# Altium footprint library Copy of PcbLib1.PcbLib: 7 footprints
Each footprint in its own frame and in the unit in brackets; x right, y up, seen from the top. Pads: shape width x height; smd on the part's side, far side on the other; paste and mask are expansions set on the pad; w line width, h text height; cw(c..) or ccw(c..) is an arc to the next point about the centre after c.
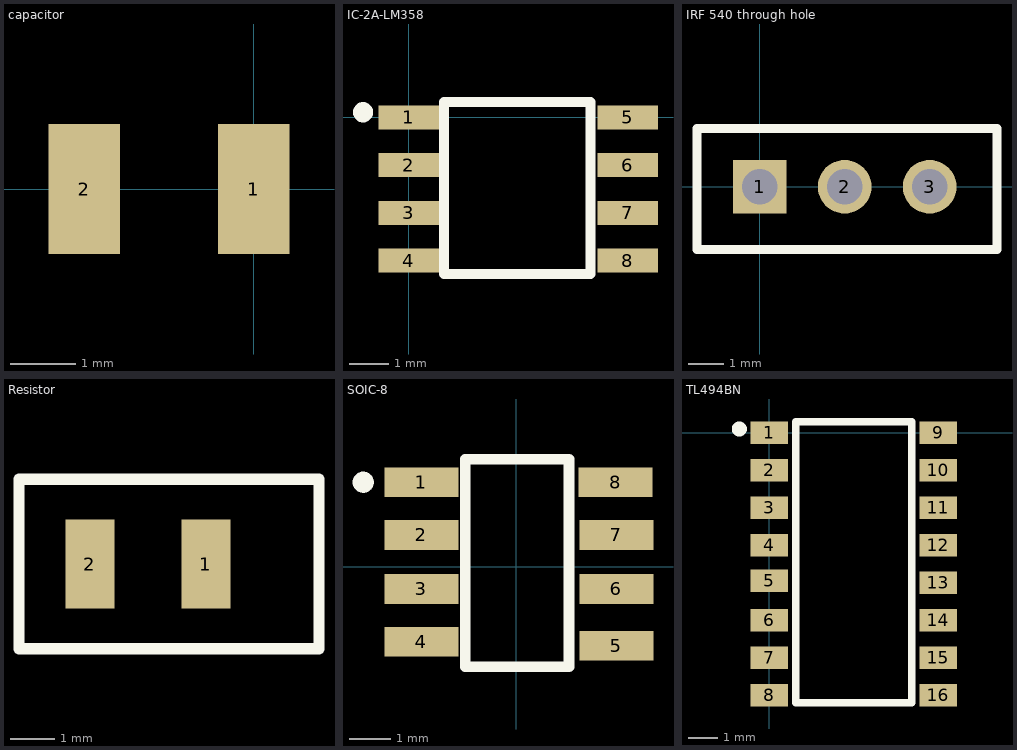
[diagram p0: the footprints below, top view; thin cyan lines are the x and y axes]

## capacitor [mm]
pads (2):
  rect 1.1x2 smd paste-2539.97 mask-2539.97: 1(0,0) 2(-2.6,0)
Top Paste:
  region: -0.55,-1 -0.55,1 0.55,1 0.55,-1
  region: -3.15,-1 -3.15,1 -2.05,1 -2.05,-1
Top Solder:
  region: -0.75,-1.25 -0.75,1.25 0.75,1.25 0.75,-1.25
  region: -3.35,-1.25 -3.35,1.25 -1.85,1.25 -1.85,-1.25

## IC-2A-LM358 [mm]
pads (8):
  rect 1.52x0.6 smd paste-2539.97 mask-2539.97: 1(0,0) 2(0,-1.2) 3(0,-2.4) 4(0,-3.6) 5(5.5,0) 6(5.5,-1.2) 7(5.5,-2.4) 8(5.5,-3.6)
Top Overlay:
  circle w0.254: c-1.143,0.127 r0.127
  lines w0.254: 0.889,-3.937 0.889,0.381 4.572,0.381 4.572,-3.937 0.889,-3.937
Top Paste:
  region: 4.738,-3.9 4.738,-3.3 6.262,-3.3 6.262,-3.9
  region: 4.738,-2.7 4.738,-2.1 6.262,-2.1 6.262,-2.7
  region: 4.738,-1.5 4.738,-0.9 6.262,-0.9 6.262,-1.5
  region: 4.738,-0.3 4.738,0.3 6.262,0.3 6.262,-0.3
  region: -0.762,-3.9 -0.762,-3.3 0.762,-3.3 0.762,-3.9
  region: -0.762,-2.7 -0.762,-2.1 0.762,-2.1 0.762,-2.7
  region: -0.762,-1.5 -0.762,-0.9 0.762,-0.9 0.762,-1.5
  region: -0.762,-0.3 -0.762,0.3 0.762,0.3 0.762,-0.3
Top Solder:
  region: 4.738,-3.9 4.738,-3.3 6.262,-3.3 6.262,-3.9
  region: 4.738,-2.7 4.738,-2.1 6.262,-2.1 6.262,-2.7
  region: 4.738,-1.5 4.738,-0.9 6.262,-0.9 6.262,-1.5
  region: 4.738,-0.3 4.738,0.3 6.262,0.3 6.262,-0.3
  region: -0.762,-3.9 -0.762,-3.3 0.762,-3.3 0.762,-3.9
  region: -0.762,-2.7 -0.762,-2.1 0.762,-2.1 0.762,-2.7
  region: -0.762,-1.5 -0.762,-0.9 0.762,-0.9 0.762,-1.5
  region: -0.762,-0.3 -0.762,0.3 0.762,0.3 0.762,-0.3

## IRF 540 through hole [mil]
pads (3):
  rect 60x60 hole 39.37: 1(0,0)
  round 60 hole 39.37: 2(94.88,0) 3(189.76,0)
Top Overlay:
  lines w10: 90,65 245,65 265,65 265,-70 -70,-70 -70,65 95,65

## PCBComponent_1 - duplicate [mil]

## Resistor [mm]
pads (2):
  rect 1.1x2 smd paste-2539.97 mask-2539.97: 1(116.332,-215.9) 2(113.732,-215.9)
Top Overlay:
  lines w0.254: 112.141,-217.805 112.141,-213.995 112.395,-213.995 118.872,-213.995 118.872,-217.805 112.141,-217.805
Top Paste:
  region: 115.782,-216.9 115.782,-214.9 116.882,-214.9 116.882,-216.9
  region: 113.182,-216.9 113.182,-214.9 114.282,-214.9 114.282,-216.9
Top Solder:
  region: 115.582,-217.15 115.582,-214.65 117.082,-214.65 117.082,-217.15
  region: 112.982,-217.15 112.982,-214.65 114.482,-214.65 114.482,-217.15

## SOIC-8 [mm]
pads (8):
  rect 1.78x0.72 smd paste-2539.97 mask-2539.97: 1(-2.286,2.032) 2(-2.286,0.762) 3(-2.286,-0.538) 4(-2.286,-1.808) 5(2.413,-1.905) 6(2.413,-0.538) 7(2.413,0.762) 8(2.394,2.032)
Top Overlay:
  circle w0.254: c-3.683,2.032 r0.127
  lines w0.254: -1.23,-2.413 -1.23,2.587 1.27,2.587 1.27,-2.413 -1.23,-2.413
Top Paste:
  region: -3.176,2.392 -1.396,2.392 -1.396,1.672 -3.176,1.672
  region: -3.176,1.122 -1.396,1.122 -1.396,0.402 -3.176,0.402
  region: -3.176,-0.178 -1.396,-0.178 -1.396,-0.898 -3.176,-0.898
  region: -3.176,-1.448 -1.396,-1.448 -1.396,-2.168 -3.176,-2.168
  region: 1.504,2.392 3.284,2.392 3.284,1.672 1.504,1.672
  region: 1.523,1.122 3.303,1.122 3.303,0.402 1.523,0.402
  region: 1.523,-0.178 3.303,-0.178 3.303,-0.898 1.523,-0.898
  region: 1.523,-1.545 3.303,-1.545 3.303,-2.265 1.523,-2.265
Top Solder:
  region: -3.286,2.457 -1.286,2.457 -1.286,1.607 -3.286,1.607
  region: -3.286,1.187 -1.286,1.187 -1.286,0.337 -3.286,0.337
  region: -3.286,-0.113 -1.286,-0.113 -1.286,-0.963 -3.286,-0.963
  region: -3.286,-1.383 -1.286,-1.383 -1.286,-2.233 -3.286,-2.233
  region: 1.394,2.457 3.394,2.457 3.394,1.607 1.394,1.607
  region: 1.413,1.187 3.413,1.187 3.413,0.337 1.413,0.337
  region: 1.413,-0.113 3.413,-0.113 3.413,-0.963 1.413,-0.963
  region: 1.413,-1.48 3.413,-1.48 3.413,-2.33 1.413,-2.33

## TL494BN [mm]
pads (16):
  rect 1.27x0.76 smd paste-2539.97 mask-2539.97: 1(0,0) 2(0,-1.27) 3(0,-2.54) 4(0,-3.81) 5(0,-5.01) 6(0,-6.35) 7(0,-7.62) 8(0,-8.89) 9(5.72,0) 10(5.72,-1.27) 11(5.72,-2.54) 12(5.72,-3.81) 13(5.72,-5.08) 14(5.72,-6.35) 15(5.72,-7.62) 16(5.72,-8.89)
Top Overlay:
  circle w0.254: c-1.016,0.127 r0.127
  lines w0.254: 0.889,-9.144 4.826,-9.144 4.826,0.381 0.889,0.381 0.889,-9.144
Top Paste:
  region: -0.635,-1.65 -0.635,-0.89 0.635,-0.89 0.635,-1.65
  region: -0.635,-2.92 -0.635,-2.16 0.635,-2.16 0.635,-2.92
  region: -0.635,-4.19 -0.635,-3.43 0.635,-3.43 0.635,-4.19
  region: 5.085,-4.19 5.085,-3.43 6.355,-3.43 6.355,-4.19
  region: 5.085,-2.92 5.085,-2.16 6.355,-2.16 6.355,-2.92
  region: 5.085,-0.38 5.085,0.38 6.355,0.38 6.355,-0.38
  region: -0.635,-5.39 -0.635,-4.63 0.635,-4.63 0.635,-5.39
  region: -0.635,-8 -0.635,-7.24 0.635,-7.24 0.635,-8
  region: -0.635,-6.73 -0.635,-5.97 0.635,-5.97 0.635,-6.73
  region: -0.635,-9.27 -0.635,-8.51 0.635,-8.51 0.635,-9.27
  region: 5.085,-5.46 5.085,-4.7 6.355,-4.7 6.355,-5.46
  region: 5.085,-6.73 5.085,-5.97 6.355,-5.97 6.355,-6.73
  region: 5.085,-8 5.085,-7.24 6.355,-7.24 6.355,-8
  region: 5.085,-9.27 5.085,-8.51 6.355,-8.51 6.355,-9.27
  region: -0.635,-0.38 -0.635,0.38 0.635,0.38 0.635,-0.38
  region: 5.085,-1.65 5.085,-0.89 6.355,-0.89 6.355,-1.65
Top Solder:
  region: -0.685,-1.7 -0.685,-0.84 0.685,-0.84 0.685,-1.7
  region: -0.685,-2.97 -0.685,-2.11 0.685,-2.11 0.685,-2.97
  region: -0.685,-4.24 -0.685,-3.38 0.685,-3.38 0.685,-4.24
  region: 5.035,-4.24 5.035,-3.38 6.405,-3.38 6.405,-4.24
  region: 5.035,-2.97 5.035,-2.11 6.405,-2.11 6.405,-2.97
  region: 5.035,-0.43 5.035,0.43 6.405,0.43 6.405,-0.43
  region: -0.685,-5.44 -0.685,-4.58 0.685,-4.58 0.685,-5.44
  region: -0.685,-8.05 -0.685,-7.19 0.685,-7.19 0.685,-8.05
  region: -0.685,-6.78 -0.685,-5.92 0.685,-5.92 0.685,-6.78
  region: -0.685,-9.32 -0.685,-8.46 0.685,-8.46 0.685,-9.32
  region: 5.035,-5.51 5.035,-4.65 6.405,-4.65 6.405,-5.51
  region: 5.035,-6.78 5.035,-5.92 6.405,-5.92 6.405,-6.78
  region: 5.035,-8.05 5.035,-7.19 6.405,-7.19 6.405,-8.05
  region: 5.035,-9.32 5.035,-8.46 6.405,-8.46 6.405,-9.32
  region: -0.685,-0.43 -0.685,0.43 0.685,0.43 0.685,-0.43
  region: 5.035,-1.7 5.035,-0.84 6.405,-0.84 6.405,-1.7
3D body "PDQ2-D24-S5-S--3DModel-STEP-269445.STEP": height 10.6, standoff -4.6, extent -1.933,-15.577 7.267,6.223